# Altium footprint library Amin-Library.PcbLib: 601 footprints (part 3 of 38)
Each footprint in its own frame and in the unit in brackets; x right, y up, seen from the top. Pads: shape width x height; smd on the part's side, far side on the other; paste and mask are expansions set on the pad; w line width, h text height; cw(c..) or ccw(c..) is an arc to the next point about the centre after c.
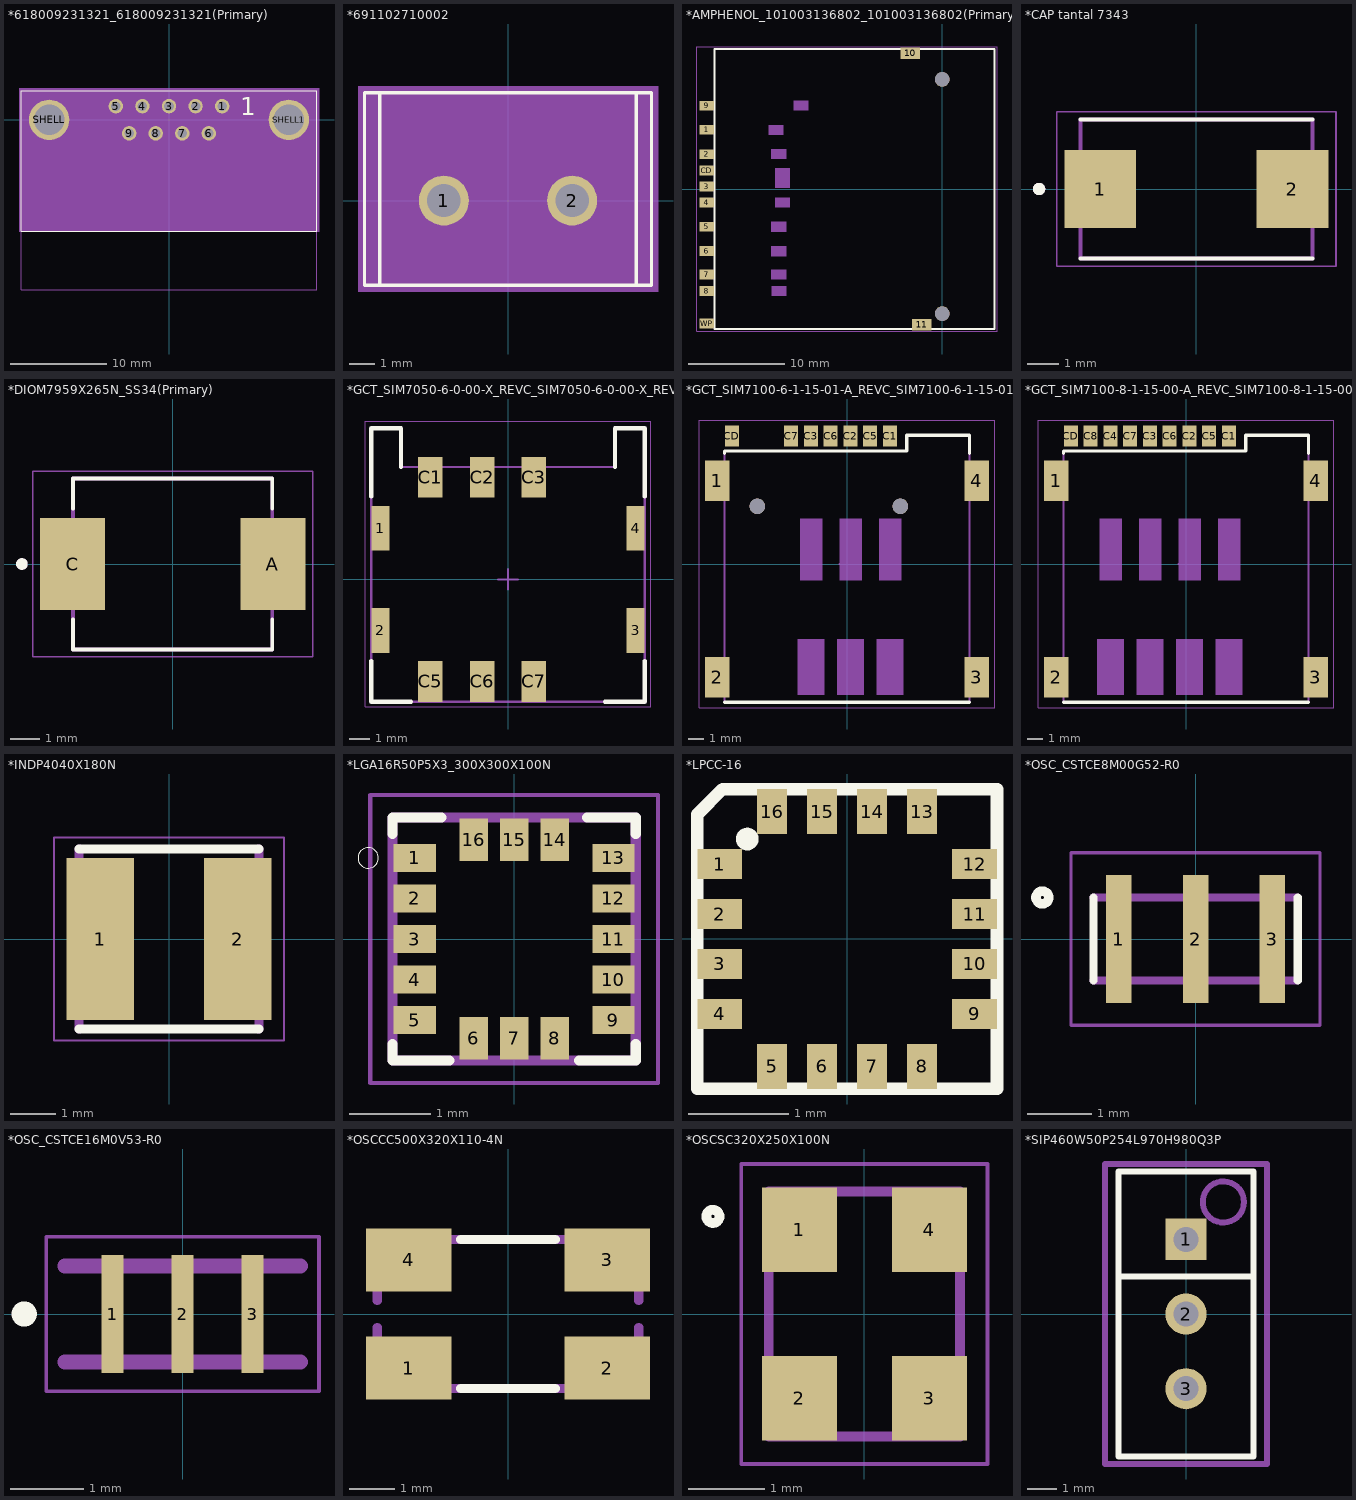
[diagram p2: the footprints below, top view; thin cyan lines are the x and y axes]

## *618009231321_618009231321(Primary) [mm]
pads (11):
  round 1.508 hole 1: 1(5.54,1.42) 2(2.77,1.42) 3(0,1.42) 4(-2.77,1.42) 5(-5.54,1.42) 6(4.155,-1.42) 7(1.385,-1.42) 8(-1.385,-1.42) 9(-4.155,-1.42)
  round 4.216 hole 3.2: SHELL(-12.5,0) SHELL1(12.5,0)
Top Overlay:
  lines w0.127: -15.4,-11.62 -15.4,3.03 15.4,3.03 15.4,-11.62 -15.4,-11.62
  text "1" at 7.415,0.485 h1.88
Mechanical 4:
  lines w0.127: -15.4,-17.72 15.4,-17.72 ; -15.4,-17.72 -15.4,-11.62 -15.4,-17.72 ; -15.4,-17.72 15.4,-17.72 ; 15.4,-17.72 15.4,-11.62 15.4,-17.72
  text "1" at 7.415,0.485 h1.88
  text "9" at -6.4,-2.455 h1.88
  text "1" at 7.415,0.485 h1.88
  text "9" at -6.4,-2.455 h1.88
  text "EDGE OF PCB Board" at -13.589,-11.049 h1.88
Mechanical 16:
  region: -15.65,3.28 15.65,3.28 15.65,-11.7 -15.65,-11.7

## *691102710002 [mm]
pads (2):
  round 1.95 hole 1.3: 1(-2.5,0) 2(2.5,0)
Top Overlay:
  lines w0.127: -5,-3.3 -5,4.2 ; -5,-3.3 5,-3.3 ; -5,-3.3 -5.6,-3.3 -5.6,4.2 -5,4.2 ; -5,4.2 5,4.2 ; 5,-3.3 5,4.2 ; 5,-3.3 5.6,-3.3 5.6,4.2 5,4.2
Mechanical 4:
  text "1" at -3.65,-2.65 h1.88
  text "1" at -3.65,-2.65 h1.88
Mechanical 16:
  region: -5.85,4.45 5.85,4.45 5.85,-3.55 -5.85,-3.55

## *AMPHENOL_101003136802_101003136802(Primary) [mm]
pads (15):
  rect 1.5x1 smd: 1(-24.31,6.1) 2(-24.31,3.6) 3(-24.31,0.25) 4(-24.31,-1.4) 5(-24.31,-3.9) 6(-24.31,-6.4) 7(-24.31,-8.83) 8(-24.31,-10.53) 9(-24.31,8.6) CD(-24.31,1.9) WP(-24.31,-13.88)
  rect 2x1.2 smd: 10(-3.3,14) 11(-2.1,-14)
  round 1.5 hole 1.5 unplated: None(0,-12.85) None(0,11.3)
Top Overlay:
  lines w0.2: -23.5,-14.45 -23.5,14.45 5.4,14.45 5.4,-14.45 -23.5,-14.45
Mechanical 16:
  region: -17.613,-10.03 -16.11,-10.03 -16.11,-11.032 -17.613,-11.032
  region: -17.615,-8.33 -16.11,-8.33 -16.11,-9.333 -17.615,-9.333
  region: -17.643,-5.9 -16.11,-5.9 -16.11,-6.913 -17.643,-6.913
  region: -17.628,-3.4 -16.11,-3.4 -16.11,-4.404 -17.628,-4.404
  region: -17.243,-0.9 -15.71,-0.9 -15.71,-1.904 -17.243,-1.904
  region: -17.212,2.14 -15.71,2.14 -15.71,0.14 -17.212,0.14
  region: -17.634,4.1 -16.11,4.1 -16.11,3.104 -17.634,3.104
  region: -17.911,6.6 -16.41,6.6 -16.41,5.6 -17.911,5.6
  region: -15.307,9.1 -13.8,9.1 -13.8,8.104 -15.307,8.104
  lines w0.05: -25.3,-14.7 -25.3,14.7 5.65,14.7 5.65,-14.7 -25.3,-14.7

## *CAP tantal 7343 [mm]
pads (2):
  rect 2.31x2.52 smd: 1(-3.1,0) 2(3.1,0)
Top Overlay:
  circle w0.2: c-5.08,0 r0.1
  lines w0.127: -3.75,-2.25 3.75,-2.25 ; -3.75,2.25 3.75,2.25
Mechanical 4:
  circle w0.2: c-5.08,0 r0.1
  circle w0.2: c-5.08,0 r0.1
  lines w0.127: -3.75,-2.25 -3.75,2.25 ; -3.75,-2.25 3.75,-2.25 ; -3.75,-2.25 -3.75,2.25 ; -3.75,-2.25 3.75,-2.25 ; -3.75,2.25 3.75,2.25 ; -3.75,2.25 3.75,2.25 ; 3.75,-2.25 3.75,2.25 ; 3.75,-2.25 3.75,2.25
Mechanical 16:
  lines w0.05: -4.505,-2.5 -4.505,2.5 4.505,2.5 4.505,-2.5 -4.505,-2.5
3D body "User Library-AVX_ACASE.step": height 1.71, standoff 0, extent -1.7,-0.713 1.7,0.967

## *DIOM7959X265N_SS34(Primary) [mm]
pads (2):
  rect 2.25x3.18 smd: A(3.455,0) C(-3.455,0)
Top Overlay:
  circle w0.2: c-5.2,0 r0.1
  lines w0.127: -3.437,-1.91 -3.437,-2.95 3.437,-2.95 3.437,-1.91 ; -3.437,1.91 -3.437,2.95 3.437,2.95 3.437,1.91
Mechanical 4:
  circle w0.2: c-5.2,0 r0.1
  circle w0.2: c-5.2,0 r0.1
  lines w0.127: -3.437,-2.95 3.437,-2.95 ; -3.437,-2.95 -3.437,2.95 ; -3.437,-2.95 3.437,-2.95 ; -3.437,-2.95 -3.437,2.95 ; -3.437,2.95 3.437,2.95 ; -3.437,2.95 3.437,2.95 ; 3.437,-2.95 3.437,2.95 ; 3.437,-2.95 3.437,2.95
Mechanical 16:
  lines w0.05: -4.83,-3.2 -4.83,3.2 4.83,3.2 4.83,-3.2 -4.83,-3.2

## *GCT_SIM7050-6-0-00-X_REVC_SIM7050-6-0-00-X_REVC(Primary) [mm]
pads (10):
  rect 0.9x2.2 smd: 1(-6.25,2.5) 2(-6.25,-2.5) 3(6.25,-2.5) 4(6.25,2.5)
  rect 1.2x2 smd: C1(-3.81,5) C2(-1.27,5) C3(1.27,5) C5(-3.81,-5) C6(-1.27,-5) C7(1.27,-5)
Top Overlay:
  lines w0.2: -6.7,-4 -6.7,-6 -4.75,-6 ; -6.7,4.05 -6.7,7.4 -5.25,7.4 -5.25,5.5 ; 4.75,-6 6.7,-6 6.7,-4 ; 5.25,5.5 5.25,7.4 6.7,7.4 6.7,4.05
Mechanical 4:
  lines w0.1: -6.7,-6 -6.7,7.4 ; -6.7,-6 6.7,-6 ; -6.7,-6 -6.7,7.4 ; -6.7,-6 6.7,-6 ; -6.7,7.4 -5.25,7.4 ; -6.7,7.4 -5.25,7.4 ; -5.25,5.5 -5.25,7.4 ; -5.25,5.5 5.25,5.5 ; -5.25,5.5 -5.25,7.4 ; -5.25,5.5 5.25,5.5 ; 5.25,5.5 5.25,7.4 ; 5.25,5.5 5.25,7.4 ; 5.25,7.4 6.7,7.4 ; 5.25,7.4 6.7,7.4 ; 6.7,-6 6.7,7.4 ; 6.7,-6 6.7,7.4
Mechanical 16:
  lines w0.05: -7,-6.25 7,-6.25 7,7.75 -7,7.75 -7,-6.25
  lines w0.1: -0.5,0 0.5,0 ; 0,-0.5 0,0.5

## *GCT_SIM7100-6-1-15-01-A_REVC_SIM7100-6-1-15-01-A_REVC(Primary) [mm]
pads (13):
  rect 1.56x2.61 smd: 1(-8.34,5.34) 2(-8.34,-7.29) 3(8.34,-7.29) 4(8.34,5.34)
  rect 0.9x1.35 smd: C1(2.755,8.215) C2(0.215,8.215) C3(-2.325,8.215) C5(1.485,8.215) C6(-1.055,8.215) C7(-3.595,8.215) CD(-7.405,8.215)
  round 1 hole 1 unplated: None(-5.765,3.71) None(3.435,3.71)
Top Overlay:
  lines w0.2: -7.875,-8.89 7.875,-8.89 ; -7.875,7.1 -7.875,7.27 3.84,7.27 3.84,8.28 7.875,8.28 7.875,7.1
Mechanical 4:
  lines w0.1: -7.875,-8.89 -7.875,7.27 ; -7.875,-8.89 7.875,-8.89 ; -7.875,-8.89 -7.875,7.27 ; -7.875,-8.89 7.875,-8.89 ; -7.875,7.27 3.84,7.27 ; -7.875,7.27 3.84,7.27 ; 3.84,7.27 3.84,8.28 ; 3.84,7.27 3.84,8.28 ; 3.84,8.28 7.875,8.28 ; 3.84,8.28 7.875,8.28 ; 7.875,-8.89 7.875,8.28 ; 7.875,-8.89 7.875,8.28
Mechanical 16:
  region: -0.465,-1.03 0.935,-1.03 0.935,2.91 -0.465,2.91
  region: 1.925,-8.41 3.625,-8.41 3.625,-4.83 1.925,-4.83
  region: 2.075,-1.03 3.475,-1.03 3.475,2.91 2.075,2.91
  region: -0.615,-8.41 1.085,-8.41 1.085,-4.83 -0.615,-4.83
  region: -3.155,-8.41 -1.455,-8.41 -1.455,-4.83 -3.155,-4.83
  region: -3.005,-1.03 -1.605,-1.03 -1.605,2.91 -3.005,2.91
  lines w0.05: -9.5,-9.25 -9.5,9.25 9.5,9.25 9.5,-9.25 -9.5,-9.25
  lines w0.1: -0.5,0 0.5,0 ; 0,-0.5 0,0.5

## *GCT_SIM7100-8-1-15-00-A_REVC_SIM7100-8-1-15-00-A_REVC(Primary) [mm]
pads (13):
  rect 1.56x2.61 smd: 1(-8.34,5.34) 2(-8.34,-7.29) 3(8.34,-7.29) 4(8.34,5.34)
  rect 0.9x1.35 smd: C1(2.755,8.215) C2(0.215,8.215) C3(-2.325,8.215) C4(-4.865,8.215) C5(1.485,8.215) C6(-1.055,8.215) C7(-3.595,8.215) C8(-6.135,8.215) CD(-7.405,8.215)
Top Overlay:
  lines w0.2: -7.875,-8.89 7.875,-8.89 ; -7.875,7.1 -7.875,7.27 3.84,7.27 3.84,8.28 7.875,8.28 7.875,7.1
Mechanical 4:
  lines w0.1: -7.875,-8.89 -7.875,7.27 ; -7.875,-8.89 7.875,-8.89 ; -7.875,-8.89 -7.875,7.27 ; -7.875,-8.89 7.875,-8.89 ; -7.875,7.27 3.84,7.27 ; -7.875,7.27 3.84,7.27 ; 3.84,7.27 3.84,8.28 ; 3.84,7.27 3.84,8.28 ; 3.84,8.28 7.875,8.28 ; 3.84,8.28 7.875,8.28 ; 7.875,-8.89 7.875,8.28 ; 7.875,-8.89 7.875,8.28
Mechanical 16:
  region: -5.695,-8.41 -3.995,-8.41 -3.995,-4.83 -5.695,-4.83
  region: -0.465,-1.03 0.935,-1.03 0.935,2.91 -0.465,2.91
  region: 1.925,-8.41 3.625,-8.41 3.625,-4.83 1.925,-4.83
  region: -5.545,-1.03 -4.145,-1.03 -4.145,2.91 -5.545,2.91
  region: 2.075,-1.03 3.475,-1.03 3.475,2.91 2.075,2.91
  region: -0.615,-8.41 1.085,-8.41 1.085,-4.83 -0.615,-4.83
  region: -3.155,-8.41 -1.455,-8.41 -1.455,-4.83 -3.155,-4.83
  region: -3.005,-1.03 -1.605,-1.03 -1.605,2.91 -3.005,2.91
  lines w0.05: -9.5,-9.25 -9.5,9.25 9.5,9.25 9.5,-9.25 -9.5,-9.25
  lines w0.1: -0.5,0 0.5,0 ; 0,-0.5 0,0.5

## *INDP4040X180N [mm]
height 5
pads (2):
  rect 1.5x3.6 smd: 1(-1.525,0) 2(1.525,0)
Top Overlay:
  lines w0.2: -2,-2 2,-2 ; -2,2 2,2
Mechanical 4:
  lines w0.2: -2,-2 -2,2 -2,-2 ; 2,-2 2,2 2,-2
Mechanical 16:
  lines w0.05: -2.55,-2.25 -2.55,2.25 2.55,2.25 2.55,-2.25 -2.55,-2.25

## *LGA16R50P5X3_300X300X100N [mm]
pads (16):
  rect 0.52x0.35 smd: 1(-1.225,1) 2(-1.225,0.5) 3(-1.225,0) 4(-1.225,-0.5) 5(-1.225,-1) 9(1.225,-1) 10(1.225,-0.5) 11(1.225,0) 12(1.225,0.5) 13(1.225,1)
  rect 0.35x0.52 smd: 6(-0.5,-1.225) 7(0,-1.225) 8(0.5,-1.225) 14(0.5,1.225) 15(0,1.225) 16(-0.5,1.225)
Top Overlay:
  circle w0: c-1.8,1 r0.126
  lines w0.127: -1.5,-1.3 -1.5,-1.5 -0.8,-1.5 ; -1.5,1.3 -1.5,1.5 -0.9,1.5 ; 0.8,-1.5 1.5,-1.5 1.5,-1.3 ; 0.9,1.5 1.5,1.5 1.5,1.3
Top Solder:
  region: -0.282,1.532 -0.282,0.92 -0.72,0.92 -0.72,1.532
  region: 0.219,1.531 0.219,0.92 -0.22,0.92 -0.22,1.531
  region: 0.719,1.531 0.719,0.921 0.281,0.921 0.281,1.531
  region: -0.722,-1.532 -0.722,-0.921 -0.279,-0.921 -0.279,-1.532
  region: -0.222,-1.532 -0.222,-0.921 0.221,-0.921 0.221,-1.532
  region: 0.279,-1.531 0.279,-0.921 0.721,-0.921 0.721,-1.531
  region: 1.53,-1.222 0.922,-1.222 0.922,-0.78 1.53,-0.78
  region: 1.53,0.781 0.921,0.781 0.921,1.22 1.53,1.22
  region: 1.53,0.281 0.923,0.281 0.923,0.72 1.53,0.72
  region: 1.53,-0.22 0.922,-0.22 0.922,0.22 1.53,0.22
  region: 1.53,-0.721 0.921,-0.721 0.921,-0.28 1.53,-0.28
  region: -1.533,-0.78 -0.92,-0.78 -0.92,-1.222 -1.533,-1.222
  region: -1.533,-0.28 -0.92,-0.28 -0.92,-0.722 -1.533,-0.722
  region: -1.533,0.22 -0.92,0.22 -0.92,-0.22 -1.533,-0.22
  region: -1.535,0.72 -0.92,0.72 -0.92,0.281 -1.535,0.281
  region: -1.535,1.22 -0.92,1.22 -0.92,0.783 -1.535,0.783
Mechanical 4:
  lines w0.127: -1.5,-1.5 1.5,-1.5 ; -1.5,-1.5 -1.5,1.5 ; -1.5,-1.5 1.5,-1.5 ; -1.5,-1.5 -1.5,1.5 ; -1.5,1.5 1.5,1.5 ; -1.5,1.5 1.5,1.5 ; 1.5,-1.5 1.5,1.5 ; 1.5,-1.5 1.5,1.5
Mechanical 16:
  lines w0.05: -1.775,-1.775 1.775,-1.775 1.775,1.775 -1.775,1.775 -1.775,-1.775

## *LPCC-16 [mm]
pads (16):
  rect 0.45x0.3 smd: 1(-1.275,0.75) 2(-1.275,0.25) 3(-1.275,-0.25) 4(-1.275,-0.75) 9(1.275,-0.75) 10(1.275,-0.25) 11(1.275,0.25) 12(1.275,0.75)
  rect 0.3x0.45 smd: 5(-0.75,-1.275) 6(-0.25,-1.275) 7(0.25,-1.275) 8(0.75,-1.275) 13(0.75,1.275) 14(0.25,1.275) 15(-0.25,1.275) 16(-0.75,1.275)
Top Overlay:
  circle w0.127: c-1,1 r0.05
  lines w0.127: -1.5,-1.5 1.5,-1.5 1.5,1.5 -1.246,1.5 -1.5,1.246 -1.5,-1.5
Top Paste:
  region: 0.65,-1.5 0.65,-1.101 0.851,-1.101 0.851,-1.5
  region: 0.15,-1.5 0.15,-1.1 0.35,-1.1 0.35,-1.5
  region: -0.352,-1.502 -0.352,-1.101 -0.149,-1.101 -0.149,-1.502
  region: -0.851,-1.501 -0.851,-1.1 -0.65,-1.1 -0.65,-1.501
  region: -0.651,1.501 -0.651,1.1 -0.85,1.1 -0.85,1.501
  region: -0.151,1.501 -0.151,1.101 -0.349,1.101 -0.349,1.501
  region: 0.349,1.501 0.349,1.101 0.151,1.101 0.151,1.501
  region: 0.85,1.5 0.85,1.101 0.651,1.101 0.651,1.5
  region: 1.5,0.65 1.101,0.65 1.101,0.85 1.5,0.85
  region: 1.5,0.15 1.1,0.15 1.1,0.35 1.5,0.35
  region: 1.5,-0.35 1.1,-0.35 1.1,-0.15 1.5,-0.15
  region: 1.5,-0.85 1.1,-0.85 1.1,-0.65 1.5,-0.65
  region: -1.502,-0.65 -1.1,-0.65 -1.1,-0.851 -1.502,-0.851
  region: -1.501,-0.15 -1.1,-0.15 -1.1,-0.35 -1.501,-0.35
  region: -1.501,0.35 -1.1,0.35 -1.1,0.15 -1.501,0.15
  region: -1.501,0.85 -1.1,0.85 -1.1,0.651 -1.501,0.651

## *OSC_CSTCE8M00G52-R0 [mm]
pads (3):
  rect 0.4x2 smd: 1(-1.2,0) 2(0,0) 3(1.2,0)
Top Overlay:
  circle w0.15: c-2.4,0.65 r0.1
  lines w0.127: -1.6,-0.65 -1.6,0.65 ; 1.6,-0.65 1.6,0.65
Mechanical 4:
  lines w0.127: -1.6,-0.65 1.6,-0.65 -1.6,-0.65 ; -1.6,0.65 1.6,0.65 -1.6,0.65
Mechanical 16:
  lines w0.05: -1.95,-1.35 1.95,-1.35 1.95,1.35 -1.95,1.35 -1.95,-1.35

## *OSC_CSTCE16M0V53-R0 [mm]
pads (3):
  rect 0.3x1.6 smd: 1(-0.95,0) 2(0,0) 3(0.95,0)
Top Overlay:
  circle w0.2: c-2.15,0 r0.071
Mechanical 4:
  lines w0.2: -1.6,-0.65 1.6,-0.65 -1.6,-0.65 ; -1.6,0.65 1.6,0.65 -1.6,0.65
Mechanical 16:
  lines w0.05: -1.85,-1.05 -1.85,1.05 1.85,1.05 1.85,-1.05 -1.85,-1.05

## *OSCCC500X320X110-4N [mm]
pads (4):
  rect 1.9x1.4 smd: 1(-2.2,-1.2) 2(2.2,-1.2) 3(2.2,1.2) 4(-2.2,1.2)
Top Overlay:
  lines w0.203: -1.05,-1.65 1.05,-1.65 ; -1.05,1.65 1.05,1.65
Mechanical 4:
  lines w0.203: -2.902,-1.225 cw(c-2.902,-1.652) -2.475,-1.652 ccw(c-2.902,-1.652) -2.902,-1.225 ; -2.902,1.225 ccw(c-2.902,1.652) -2.475,1.652 cw(c-2.902,1.652) -2.902,1.225 ; -2.9,-1.225 -2.9,-0.3 -2.9,-1.225 ; -2.9,0.3 -2.9,1.225 -2.9,0.3 ; -2.475,-1.65 -1.05,-1.65 -2.475,-1.65 ; -2.475,1.65 -1.05,1.65 -2.475,1.65 ; 1.05,-1.65 2.475,-1.65 1.05,-1.65 ; 1.05,1.65 2.475,1.65 1.05,1.65 ; 2.475,-1.652 cw(c2.902,-1.652) 2.902,-1.225 ccw(c2.902,-1.652) 2.475,-1.652 ; 2.475,1.652 ccw(c2.902,1.652) 2.902,1.225 cw(c2.902,1.652) 2.475,1.652 ; 2.9,-1.225 2.9,-0.3 2.9,-1.225 ; 2.9,0.3 2.9,1.225 2.9,0.3

## *OSCSC320X250X100N [mm]
pads (4):
  rect 0.98x1.1 smd: 1(-0.85,1.1) 2(-0.85,-1.1) 3(0.85,-1.1) 4(0.85,1.1)
Top Overlay:
  circle w0.127: c-1.979,1.275 r0.086
Mechanical 4:
  lines w0.127: -1.25,-1.6 -1.25,1.6 ; -1.25,-1.6 1.25,-1.6 ; -1.25,-1.6 -1.25,1.6 ; -1.25,-1.6 1.25,-1.6 ; -1.25,1.6 1.25,1.6 ; -1.25,1.6 1.25,1.6 ; 1.25,-1.6 1.25,1.6 ; 1.25,-1.6 1.25,1.6
Mechanical 16:
  lines w0.05: -1.61,-1.96 -1.61,1.96 1.61,1.96 1.61,-1.96 -1.61,-1.96
3D body "User Library-Crystal_ECX-32.STEP": height 0.82, standoff 0, extent -1.25,-1.6 1.25,1.6

## *SIP460W50P254L970H980Q3P [mm]
pads (3):
  rect 1.4x1.4 hole 0.85: 1(0,2.54)
  round 1.4 hole 0.85: 2(0,0) 3(0,-2.54)
Top Overlay:
  lines w0.2: -2.3,1.27 -2.3,-4.85 2.3,-4.85 2.3,1.27 ; -2.3,1.27 -2.3,4.85 2.3,4.85 2.3,1.27 ; -2.3,1.27 2.3,1.27
Mechanical 4:
  circle w0.2: c1.27,3.81 r0.7
  circle w0.2: c1.27,3.81 r0.7
Mechanical 16:
  lines w0.2: -2.75,-5.1 2.75,-5.1 2.75,5.1 -2.75,5.1 -2.75,-5.1